# Altium footprint library Miscellaneous Devices.PcbLib: 306 footprints (part 8 of 20)
Each footprint in its own frame and in the unit in brackets; x right, y up, seen from the top. Pads: shape width x height; smd on the part's side, far side on the other; paste and mask are expansions set on the pad; w line width, h text height; cw(c..) or ccw(c..) is an arc to the next point about the centre after c.
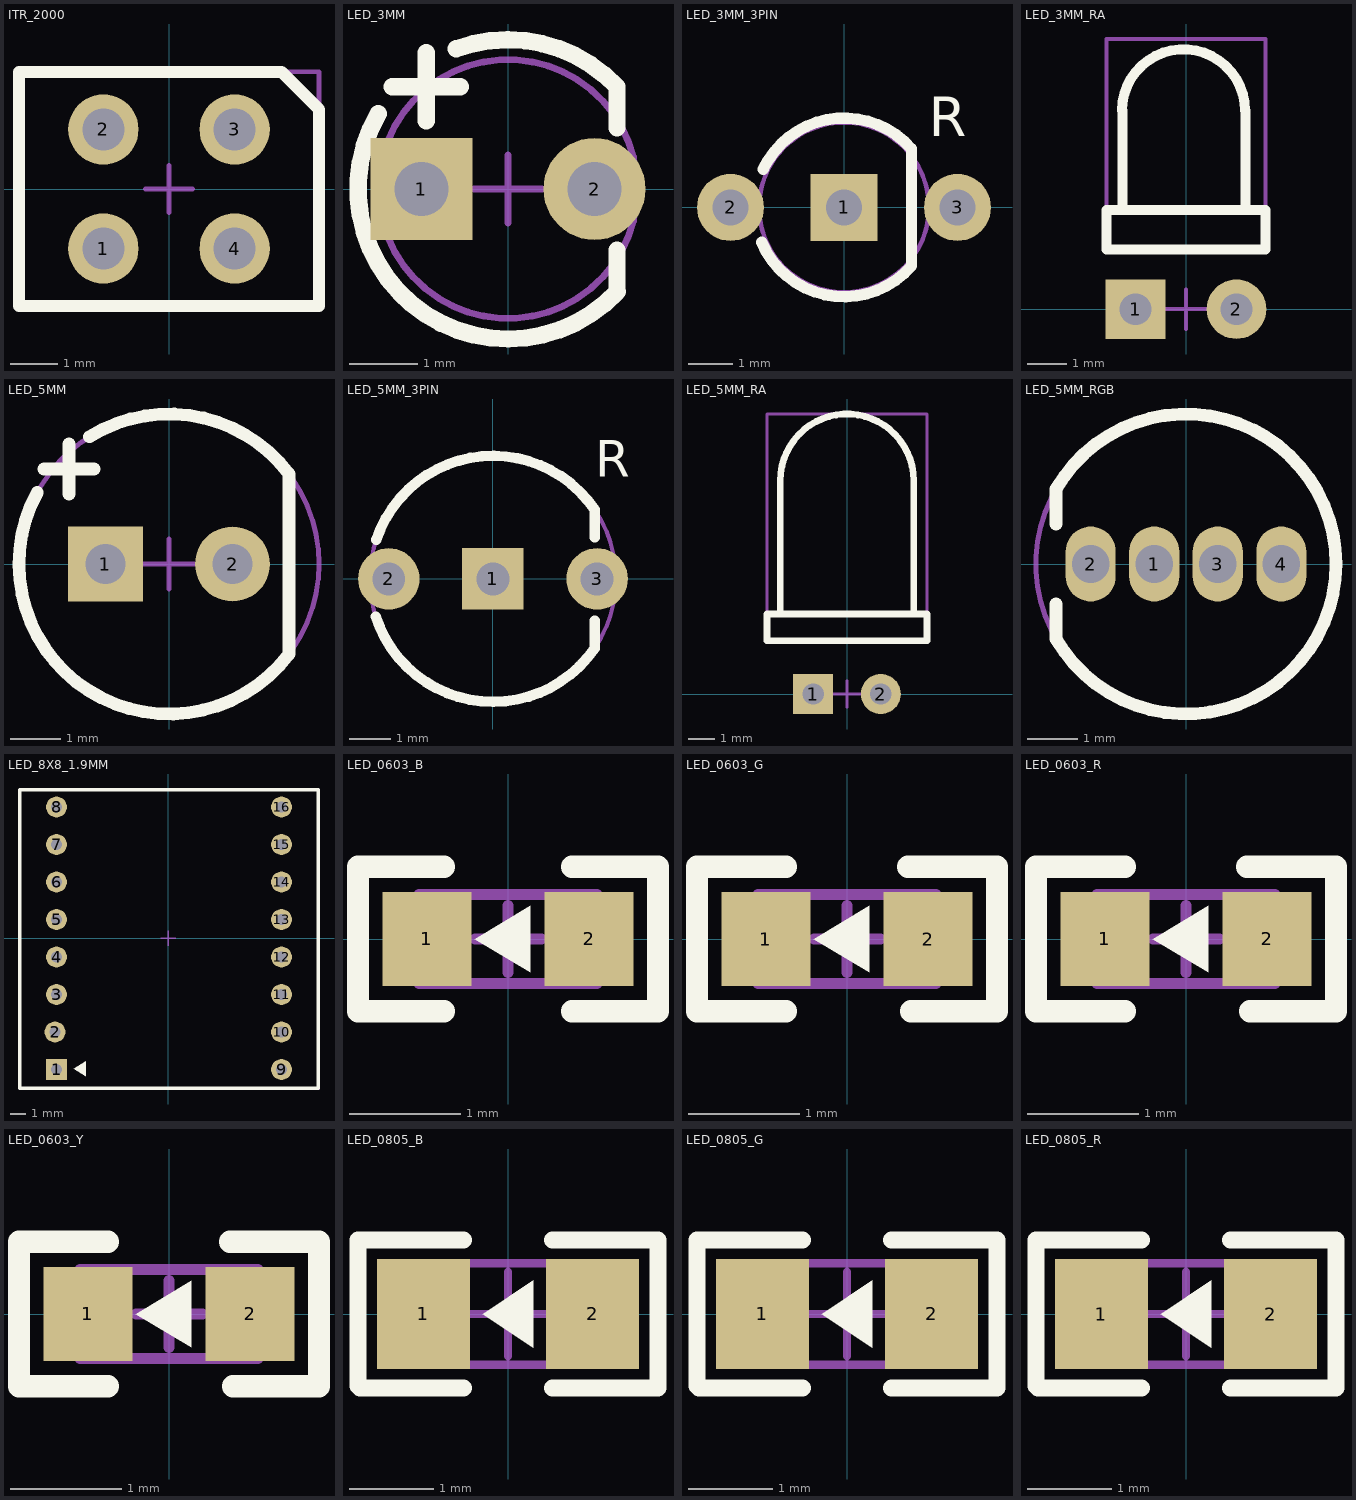
[diagram p7: the footprints below, top view; thin cyan lines are the x and y axes]

## ITR_2000 [mm]
pads (4):
  round 1.5 hole 0.9: 1(-1.4,-1.27) 2(-1.4,1.27) 3(1.4,1.27) 4(1.4,-1.27)
Top Overlay:
  lines w0.254: -3.2,-2.5 3.2,-2.5 3.2,1.7 2.4,2.5 -3.2,2.5 -3.2,-2.5
Mechanical 15:
  lines w0.1: -0.5,0 0.5,0 ; 0,-0.5 0,0.5 ; -3.2,-2.5 -3.2,2.5 3.2,2.5 3.2,-2.5 -3.2,-2.5
3D body: height 0.5, standoff -2, extent 1.151,-1.52 1.649,-1.021
3D body: height 0.5, standoff -2, extent -1.649,-1.52 -1.151,-1.021
3D body: height 0.5, standoff -2, extent 1.15,1.02 1.648,1.519
3D body: height 0.5, standoff -2, extent -1.65,1.02 -1.152,1.52
3D body: height 6.5, standoff 6.4, extent 2.5,-2.3 2.9,-1.3
3D body: height 6.5, standoff 6.4, extent -2.95,-2.25 -2.25,-1.45
3D body: height 6.45, standoff 4, extent -2.6,2.2 2.6,2.5
3D body: height 6.45, standoff 4, extent -2.6,-2.5 2.6,-2.2
3D body: height 6.5, standoff 3, extent 0.4,-1.148 2.691,1.148
3D body: height 6.5, standoff 3, extent -2.691,-1.148 -0.4,1.148
3D body: height 6.45, standoff 0, extent -3.2,-2.5 3.2,2.5

## LED_3MM [mm]
pads (2):
  rect 1.5x1.5 hole 0.8: 1(-1.27,0)
  round 1.5 hole 0.8: 2(1.27,0)
Top Overlay:
  lines w0.254: -1.906,1.103 ccw(c0,0) 1.607,-1.506 ; -1.7,1.5 -0.7,1.5 ; -1.2,1 -1.2,2 ; -0.758,2.058 cw(c0,0) 1.6,1.5 1.6,0.9 ; 1.6,-1.5 1.6,-0.9
Mechanical 15:
  circle w0.1: c0,0 r1.9
  lines w0.1: -0.5,0 0.5,0 ; 0,-0.5 0,0.5
3D body: height 5.2, standoff -3, extent -1.942,-1.986 1.542,2

## LED_3MM_3PIN [mm]
pads (3):
  rect 1.5x1.5 hole 0.8: 1(0,0)
  round 1.5 hole 0.8: 2(-2.54,0) 3(2.54,0)
Top Overlay:
  lines w0.254: -1.843,-0.776 ccw(c0,0) 1.511,-1.31 1.511,1.31 ccw(c0,0) -1.81,0.852
  text "R" at 1.9,1.3 h1.52
Mechanical 15:
  circle w0.1: c0,0 r1.9
3D body: height 7.71, standoff -2.33, extent -2.794,-2.048 2.794,2

## LED_3MM_RA [mm]
pads (2):
  rect 1.5x1.5 hole 0.8: 1(-1.27,0)
  round 1.5 hole 0.8: 2(1.27,0)
Top Overlay:
  lines w0.254: -1.612,5 cw(c-0.062,4.992) 1.488,5 ; -1.6,2.5 -1.6,5 ; 1.5,2.5 1.5,5 ; -2,1.5 2,1.5 2,2.5 -2,2.5 -2,1.5
Mechanical 15:
  lines w0.1: -0.5,0 0.5,0 ; 0,-0.5 0,0.5 ; -2,1.5 -2,6.8 2,6.8 2,1.5 -2,1.5
3D body: height 3.99, standoff -2, extent -1.567,-0.2 1.967,6.552

## LED_5MM [mm]
pads (2):
  rect 1.5x1.5 hole 0.8: 1(-1.27,0)
  round 1.5 hole 0.8: 2(1.27,0)
Top Overlay:
  lines w0.254: -2.638,1.429 ccw(c0,0) 2.4,-1.8 2.4,1.8 ccw(c0,0) -1.59,2.544 ; -2.5,1.9 -1.5,1.9 ; -2,1.4 -2,2.4
Mechanical 15:
  circle w0.1: c0,0 r3
  lines w0.1: -0.5,0 0.5,0 ; 0,-0.5 0,0.5
3D body: height 8.5, standoff -5, extent -3,-3 2.5,3

## LED_5MM_3PIN [mm]
pads (3):
  rect 1.5x1.5 hole 0.8: 1(0,0)
  round 1.5 hole 0.8: 2(-2.54,0) 3(2.54,0)
Top Overlay:
  lines w0.254: -2.856,-0.918 ccw(c0,0) 2.481,-1.687 2.481,-1.019 ; -2.846,0.949 cw(c0,0) 2.481,1.687 2.481,1.019
  text "R" at 2.5,2.2 h1.52
Mechanical 15:
  circle w0.1: c0,0 r3
3D body: height 12.5, standoff -3.5, extent -3.012,-2.9 2.932,2.9

## LED_5MM_RA [mm]
pads (2):
  rect 1.5x1.5 hole 0.8: 1(-1.27,0)
  round 1.5 hole 0.8: 2(1.27,0)
Top Overlay:
  lines w0.254: -2.5,3 -2.5,8 cw(c0,8) 2.5,8 2.5,3 ; -3,2 -3,3 3,3 3,2 -3,2
Mechanical 15:
  lines w0.1: -0.5,0 0.5,0 ; 0,-0.5 0,0.5 ; -3,2 3,2 3,10.5 -3,10.5 -3,2
3D body: height 5.99, standoff -3, extent -2.626,-0.261 3,10.461

## LED_5MM_RGB [mm]
pads (4):
  oval 1x1.5 hole 0.75: 1(-0.635,0) 2(-1.905,0) 3(0.635,0) 4(1.905,0)
Top Overlay:
  lines w0.254: -2.599,-0.8 -2.599,-1.499 ccw(c0,0) -2.598,1.5 -2.598,0.802
Mechanical 15:
  circle w0.1: c0,0 r3
3D body: height 9.7, standoff -3, extent -2.505,-2.9 2.895,2.9

## LED_8X8_1.9MM [mm]
pads (16):
  rect 1.4x1.4 hole 0.7: 1(-7.45,-8.75)
  round 1.4 hole 0.7: 2(-7.55,-6.25) 3(-7.45,-3.75) 4(-7.45,-1.25) 5(-7.45,1.25) 6(-7.45,3.75) 7(-7.45,6.25) 8(-7.45,8.75) 9(7.55,-8.75) 10(7.55,-6.25) 11(7.55,-3.75) 12(7.55,-1.25) 13(7.55,1.25) 14(7.55,3.75) 15(7.55,6.25) 16(7.55,8.75)
Top Overlay:
  region: -5.5,-9.2 -5.5,-8.2 -6.3,-8.7
  lines w0.254: -9.9,-10 -9.9,9.9 10,9.9 10,-10 -9.9,-10
Mechanical 15:
  lines w0.1: -0.5,0 0.5,0 ; 0,-0.5 0,0.5 ; -9.95,-10.05 -9.95,9.95 10.05,9.95 10.05,-10.05 -9.95,-10.05
3D body: height 6, standoff -5, extent -9.95,-10.05 10.05,9.95

## LED_0603_B [mm]
pads (2):
  rect 0.8x0.85 smd: 1(-0.73,0) 2(0.73,0)
Top Overlay:
  region: -0.3,0 0.2,-0.3 0.2,0.3
  lines w0.2: -0.575,-0.65 -1.35,-0.65 -1.35,0.65 -0.575,0.65 ; 0.575,-0.65 1.35,-0.65 1.35,0.65 0.575,0.65
Mechanical 15:
  lines w0.1: -0.297,0 0.303,0 ; 0,-0.3 0,0.3 ; -0.8,-0.4 -0.8,0.4 0.8,0.4 0.8,-0.4 -0.8,-0.4
3D body: height 0.6, standoff 0, extent -0.81,-0.4 0.81,0.4

## LED_0603_G [mm]
pads (2):
  rect 0.8x0.85 smd: 1(-0.73,0) 2(0.73,0)
Top Overlay:
  region: -0.3,0 0.2,-0.3 0.2,0.3
  lines w0.2: -0.55,-0.65 -1.35,-0.65 -1.35,0.65 -0.55,0.65 ; 0.55,0.65 1.35,0.65 1.35,-0.65 0.575,-0.65
Mechanical 15:
  lines w0.1: -0.297,0 0.303,0 ; 0,-0.3 0,0.3 ; -0.8,-0.4 0.8,-0.4 0.8,0.4 -0.8,0.4 -0.8,-0.4
3D body: height 0.6, standoff 0, extent -0.81,-0.4 0.81,0.4

## LED_0603_R [mm]
pads (2):
  rect 0.8x0.85 smd: 1(-0.73,0) 2(0.73,0)
Top Overlay:
  region: -0.3,0 0.2,-0.3 0.2,0.3
  lines w0.2: -0.55,-0.65 -1.35,-0.65 -1.35,0.65 -0.55,0.65 ; 0.55,0.65 1.35,0.65 1.35,-0.65 0.575,-0.65
Mechanical 15:
  lines w0.1: -0.297,0 0.303,0 ; 0,-0.3 0,0.3 ; -0.8,-0.4 0.8,-0.4 0.8,0.4 -0.8,0.4 -0.8,-0.4
3D body: height 0.6, standoff 0, extent -0.81,-0.4 0.81,0.4

## LED_0603_Y [mm]
pads (2):
  rect 0.8x0.85 smd: 1(-0.73,0) 2(0.73,0)
Top Overlay:
  region: -0.3,0 0.2,-0.3 0.2,0.3
  lines w0.2: -0.55,-0.65 -1.35,-0.65 -1.35,0.65 -0.55,0.65 ; 0.55,0.65 1.35,0.65 1.35,-0.65 0.575,-0.65
Mechanical 15:
  lines w0.1: -0.297,0 0.303,0 ; 0,-0.3 0,0.3 ; -0.8,-0.4 0.8,-0.4 0.8,0.4 -0.8,0.4 -0.8,-0.4
3D body: height 0.6, standoff 0, extent -0.81,-0.4 0.81,0.4

## LED_0805_B [mm]
pads (2):
  rect 1.1x1.3 smd: 1(-1,0) 2(1,0)
Top Overlay:
  region: -0.3,0 0.3,-0.4 0.3,0.4
  lines w0.2: -1.775,-0.85 -1.775,0.875 -0.525,0.875 ; -1.75,-0.875 -0.525,-0.875 ; 0.525,-0.875 1.775,-0.875 1.775,0.875 0.525,0.875
Mechanical 15:
  lines w0.1: -0.5,0 0.5,0 ; 0,-0.5 0,0.5 ; -1,-0.6 -1,0.6 1,0.6 1,-0.6 -1,-0.6
3D body: height 1.1, standoff 0, extent -1.01,-0.625 1.01,0.625

## LED_0805_G [mm]
pads (2):
  rect 1.1x1.3 smd: 1(-1,0) 2(1,0)
Top Overlay:
  region: -0.3,0 0.3,-0.4 0.3,0.4
  lines w0.2: -1.775,-0.85 -1.775,0.875 -0.525,0.875 ; -1.75,-0.875 -0.525,-0.875 ; 0.525,-0.875 1.775,-0.875 1.775,0.875 0.525,0.875
Mechanical 15:
  lines w0.1: -0.5,0 0.5,0 ; 0,-0.5 0,0.5 ; -1,-0.6 1,-0.6 1,0.6 -1,0.6 -1,-0.6
3D body: height 1.1, standoff 0, extent -1.01,-0.625 1.01,0.625

## LED_0805_R [mm]
pads (2):
  rect 1.1x1.3 smd: 1(-1,0) 2(1,0)
Top Overlay:
  region: -0.3,0 0.3,-0.4 0.3,0.4
  lines w0.2: -1.775,-0.85 -1.775,0.875 -0.525,0.875 ; -1.75,-0.875 -0.525,-0.875 ; 0.525,-0.875 1.775,-0.875 1.775,0.875 0.525,0.875
Mechanical 15:
  lines w0.1: -0.5,0 0.5,0 ; 0,-0.5 0,0.5 ; -1,-0.6 -1,0.6 1,0.6 1,-0.6 -1,-0.6
3D body: height 1.1, standoff 0, extent -1.01,-0.625 1.01,0.625